# Altium integrated library C3225X7R1A226M230AC.IntLib: 1 symbol
Pins are listed as number, name and electrical type; pins without a type are passive.

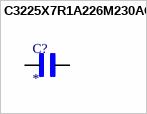
[diagram p0: symbol C3225X7R1A226M230AC]

## C3225X7R1A226M230AC
designator C?
22 ÂµF Â±20% 10V Ceramic Capacitor X7R 1210 (3225 Metric); MF: TDK; MP: C3225X7R1A226M230AC; SnapEDA_Link: https://www.snapeda.com/parts/C3225X7R1A226M230AC/TDK/view-part/?ref=snap; Package: 3225-2 TDK; Value: *; Check_prices: https://www.snapeda.com/parts/C3225X7R1A226M230AC/TDK/view-part/?ref=eda
footprint CAP_C3225X7R1A226M230AC
pins: 1, 2